# Altium footprint library 5034800600.PcbLib: 1 footprints
Each footprint in its own frame and in the unit in brackets; x right, y up, seen from the top. Pads: shape width x height; smd on the part's side, far side on the other; paste and mask are expansions set on the pad; w line width, h text height; cw(c..) or ccw(c..) is an arc to the next point about the centre after c.
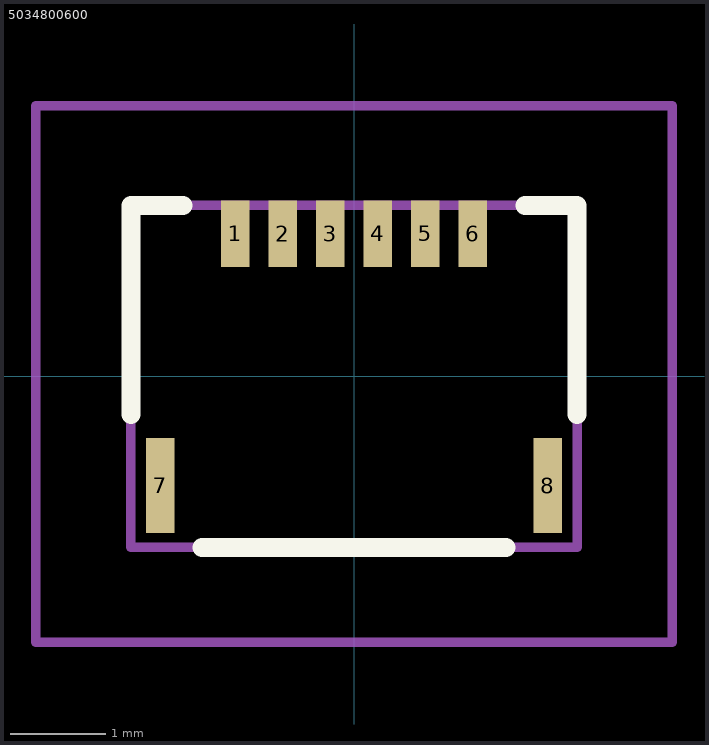
[diagram p0: the footprint, top view; thin cyan lines are the x and y axes]

## 5034800600 [mm]
pads (8):
  rect 0.3x0.7 smd: 1(-1.25,1.5) 2(-0.75,1.5) 3(-0.25,1.5) 4(0.25,1.5) 5(0.75,1.5) 6(1.25,1.5)
  rect 0.3x1 smd: 7(-2.04,-1.15) 8(2.04,-1.15)
Top Overlay:
  lines w0.2: -2.35,-0.4 -2.35,1.8 -1.8,1.8 ; -1.6,-1.8 1.6,-1.8 ; 1.8,1.8 2.35,1.8 2.35,-0.4
Mechanical 15:
  lines w0.1: -2.35,-1.8 -2.35,1.8 2.35,1.8 2.35,-1.8 -2.35,-1.8
Mechanical 20:
  lines w0.1: -3.35,-2.8 -3.35,2.85 3.35,2.85 3.35,-2.8 -3.35,-2.8
3D body "503480-0600.stp": height 1.85, standoff -0.02, extent -2.35,-1.778 2.35,1.822